# Altium schematic symbol library 830105863709.SchLib: 1 symbol
Pins are listed as number, name and electrical type; pins without a type are passive.

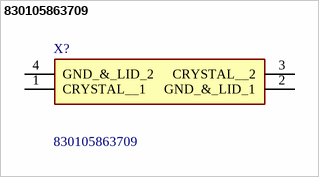
[diagram p0: symbol 830105863709]

## 830105863709
designator X?
Standard 3.2 x 2.5mm SMD crystal in a ceramic package with a seam sealed metal lid, hermetically sealed; Manufacturer_Name: Wurth Elektronik; Geometry.Height: 0.8mm; Mouser Part Number: 710-830105863709; Mouser Price/Stock: https://www.mouser.co.uk/ProductDetail/Wurth-Elektronik/830105863709?qs=hd1VzrDQEGgXVxZIC%252BUALw%3D%3D; Manufacturer_Part_Number: 830105863709; Datasheet Link: https://www.we-online.com/catalog/datasheet/830105863709.pdf
footprint 830105863709
pins: 1 CRYSTAL__1, 2 GND_&_LID_1, 3 CRYSTAL__2, 4 GND_&_LID_2